# Altium schematic symbol library Inductor.SchLib: 326 symbols (part 6 of 7)
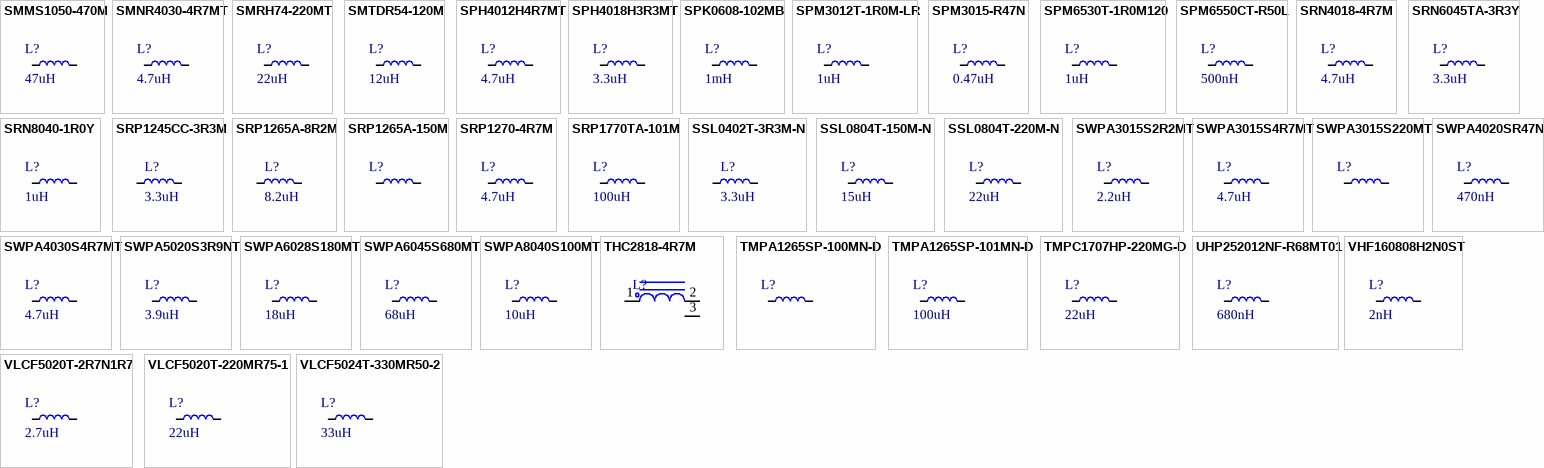
[diagram p13: symbols SMMS1050-470M to VLCF5024T-330MR50-2]

## SPH4012H4R7MT
designator L?, comment 4.7uH
1.2A 4.7uH ±20% 108mΩ SMD Power Inductors ROHS; Manufacturer: Sunlord; Manufacturer Part Number: SPH4012H4R7MT; Supplier 1: Digi-Key; RoHS: No; Pricing 1: 4500=0.21008 (USD); Supplier Part Number 1: 3442-SPH4012H4R7MTTR-ND; LCSC Part Number: C98396; Item Type: Inductor; ComponentLink1Description: LCSC; ComponentLink1URL: https://www.lcsc.com/product-detail/Power-Inductors_Sunlord-SPH4012H4R7MT_C98396.html
footprint SPH4012H4R7MT
pins: 1, 2

## SPH4018H3R3MT
designator L?, comment 3.3uH
Fixed Ind 3.3UH 2A 66 Mohm SMD; Manufacturer: Sunlord; Manufacturer Part Number: SPH4018H3R3MT; Supplier 1: Digi-Key; RoHS: No; Supplier Part Number 1: 3442-SPH4018H3R3MTTR-ND; LCSC Part Number: C98399
footprint SPH4018H3R3MT_
pins: 1, 2

## SPK0608-102MB
designator L?, comment 1mH
200mA 1mH ±20% Plugin,D7xL11mm Color Ring Inductors/Through Hole Inductors ROHS; Manufacturer: LanTu Micro; Manufacturer Part Number: SPK0608-102MB; ComponentLink1Description: LCSC; ComponentLink1URL: https://www.lcsc.com/product-detail/Color-Ring-Inductors-Through-Hole-Inductors_LanTu-Micro-SPK0608-102MB_C5127530.html; Package: Plugin,D7xL11mm; LCSC Part Number: C5127530; Item Type: Through Hole Inductor
footprint SPK0608-102MB
pins: 1, 2

## SPM3012T-1R0M-LR
designator L?, comment 1uH
FIXED IND 1UH 3.4A 59.4 MOHM SMD; Manufacturer: TDK; Manufacturer Part Number: SPM3012T-1R0M-LR; Item Type: Inductors; Supplier: Avnet; LCSC Part Number: C501975; RoHS: Yes; Stock: 20000; Pricing: 2000=0.4697, 4000=0.45815, 8000=0.4466 (USD); ComponentLink1URL: https://product.tdk.com/info/en/catalog/datasheets/inductor_commercial_power_spm3012-lr_en.pdf?ref_disty=digikey&src-supplier=Digikey; ComponentLink1Description: https://product.tdk.com/info/en/catalog/datasheets/inductor_commercial_power_spm3012-lr_en.pdf?ref_disty=digikey&src-supplier=Digikey; ComponentLink2URL: https://product.tdk.com/info/en/catalog/datasheets/inductor_commercial_power_spm3012-lr_en.pdf?src-supplier=Digikey; ComponentLink2Description: https://product.tdk.com/info/en/catalog/datasheets/inductor_commercial_power_spm3012-lr_en.pdf?src-supplier=Digikey; ComponentLink3URL: http://www.farnell.com/datasheets/2053093.pdf?src-supplier=Element14; ComponentLink3Description: http://www.farnell.com/datasheets/2053093.pdf?src-supplier=Element14; ComponentLink4URL: https://datasheet.octopart.com/SPM3012T-1R0M-LR-TDK-datasheet-62334280.pdf?src-supplier=Newark; ComponentLink4Description: https://datasheet.octopart.com/SPM3012T-1R0M-LR-TDK-datasheet-62334280.pdf?src-supplier=Newark
footprint SPM3012T-1R0M-LR
pins: 1, 2

## SPM3015-R47N
designator L?, comment 0.47uH
3.7A 0.47uH ±30% 6A 1212 Power Inductors ROHS; Manufacturer: KOHERelec; Manufacturer Part Number: SPM3015-R47N; Package: 1212; LCSC Part Number: C2761886; Item Type: Inductor; ComponentLink1Description: LCSC; ComponentLink1URL: https://www.lcsc.com/product-detail/Power-Inductors_KOHERelec-SPM3015-R47N_C2761886.html?s_z=n_744383350047
footprint SPM3015-R47N
pins: 1, 2

## SPM6530T-1R0M120
designator L?, comment 1uH
FIXED IND 1UH 13A 7.81 MOHM SMD; Manufacturer: TDK; Manufacturer Part Number: SPM6530T-1R0M120; Item Type: Inductors; Supplier: Arrow Electronics; LCSC Part Number: C87572; RoHS: Yes; Stock: 12000; Pricing: 1000=0.5301, 2000=0.4841, 3000=0.4837, 5000=0.4592, 7000=0.433, 10000=0.416 (USD); Lead Free: 5697LeadFree; ComponentLink1URL: https://datasheet.ciiva.com/22729/e531-spm-22729324.pdf?src-supplier=Element14; ComponentLink1Description: https://datasheet.ciiva.com/22729/e531-spm-22729324.pdf?src-supplier=Element14; ComponentLink2URL: https://datasheet.ciiva.com/8045/1649093-8045737.pdf?src-supplier=Element14; ComponentLink2Description: https://datasheet.ciiva.com/8045/1649093-8045737.pdf?src-supplier=Element14; ComponentLink3URL: https://datasheet.ciiva.com/15992/e531-spm6530-15992135.pdf?src-supplier=Onlinecomponents.com; ComponentLink3Description: https://datasheet.ciiva.com/15992/e531-spm6530-15992135.pdf?src-supplier=Onlinecomponents.com; ComponentLink4URL: https://datasheet.ciiva.com/1047/e531-spm-1047419.pdf?src-supplier=Digikey; ComponentLink4Description: https://datasheet.ciiva.com/1047/e531-spm-1047419.pdf?src-supplier=Digikey; ComponentLink5URL: https://datasheet.ciiva.com/1047/e531-spm-1047420.pdf?src-supplier=Digikey; ComponentLink5Description: https://datasheet.ciiva.com/1047/e531-spm-1047420.pdf?src-supplier=Digikey; ComponentLink6URL: https://datasheet.ciiva.com/1047/e531-spm-1047421.pdf?src-supplier=Digikey; ComponentLink6Description: https://datasheet.ciiva.com/1047/e531-spm-1047421.pdf?src-supplier=Digikey; ComponentLink7URL: https://datasheet.ciiva.com/16488/inductor-commercial-power-spm-en-16488758.pdf?src-supplier=Future+Electronics; ComponentLink7Description: https://datasheet.ciiva.com/16488/inductor-commercial-power-spm-en-16488758.pdf?src-supplier=Future+Electronics
footprint SPM6530T-1R0M120
pins: 1, 2

## SPM6550CT-R50L
designator L?, comment 500nH
13.2A 500nH ±15% 3.9mΩ 20.4A - Power Inductors ROHS; Manufacturer: TDK; Manufacturer Part Number: SPM6550CT-R50L; Supplier 1: Arrow Electronics; RoHS: No; Category: Fixed Inductors; Stock 1: 629; Pricing 1: 1=0.46220, 10=0.45510, 25=0.44790, 50=0.44080, 100=0.43370, 250=0.42650, 500=0.41940 (USD); LCSC Part Number: C2045557; Item Type: Inductor; Supplier Part Number 1: SPM6550CT-R50L; ComponentLink1Description: LCSC; ComponentLink1URL: https://www.lcsc.com/product-detail/Power-Inductors_TDK-SPM6550CT-R50L_C2045557.html
footprint SPM6550CT-R50L
pins: 1, 2

## SRN4018-4R7M
designator L?, comment 4.7uH
FIXED IND 4.7UH 1.9A 84 MOHM SMD; Manufacturer: Bourns; Manufacturer Part Number: SRN4018-4R7M; Core Material: Ferrite; Material: Steel; Saturation Current: 2A; Tolerance: 20%; Shielding: Shielded; DC Resistance (DCR): 84mR; Self Resonant Frequency: 35MHz; Test Frequency: 100kHz; Q Factor: 9NUMBER; Supplier: Rs; LCSC Part Number: C780206; RoHS: Yes; Category: Fixed Inductors; Stock: 13110; Mounting Technology: Surface Mount; Case/Package: Nonstandard; Pins: 2; Min Operating Temperature: -25°C; Max Operating Temperature: 120°C; Packaging: Cut Tape; Package Quantity: 3000; Current Rating: 1.9A; Value: 4.7uH; Inductance Tolerance: 20%; Max DC Current: 1.9A; Termination: SMD/SMT; RMS Current (Irms): 1.9A; Series: SRN4018; Sample Rate (Hz): 100kHz; ESR: 84mR; Length: 4mm; Width: 4mm; Height: 1.8mm; Height - Seated (Max): 0.071inch; Depth: 4.2mm; Radiation Hardening: No; Reach SVHC Compliant: No; RoHS Compliant: Yes; ComponentLink1URL: https://datasheet.ciiva.com/6700/srn4018-6700960.pdf?src-supplier=Digikey; ComponentLink1Description: https://datasheet.ciiva.com/6700/srn4018-6700960.pdf?src-supplier=Digikey; Supplier Part Number: C135270; Pricing: 10=0.0497, 100=0.0399, 300=0.035, 2000=0.0313, 4000=0.0283, 10000=0.0269 (USD)
footprint SRN4018-4R7M
pins: 1, 2

## SRN6045TA-3R3Y
designator L?, comment 3.3uH
FIXED IND 3.3UH 5A 21 MOHM SMD; Manufacturer: Bourns; Manufacturer Part Number: SRN6045TA-3R3Y; Saturation Current: 7.8A; DC Resistance (DCR): 21mR; Inductance Tolerance: 30%; Supplier 1: Digi-Key; Stock 1: 12225; Pricing 1: 1=0.59, 10=0.514, 25=0.4776, 50=0.4042, 100=0.3675, 250=0.34544, 500=0.3087 (USD); Mount: Surface Mount; Inductance: 3.3uH; RMS Current (Irms): 5A; Packaging: Cut Tape; REACH SVHC: No SVHC; RoHS Compliant: Yes; ComponentLink1URL: http://www.farnell.com/datasheets/2647414.pdf?src-supplier=Farnell; ComponentLink1Description: http://www.farnell.com/datasheets/2647414.pdf?src-supplier=Farnell; ComponentLink2URL: http://www.farnell.com/datasheets/2113223.pdf?src-supplier=Element14; ComponentLink2Description: http://www.farnell.com/datasheets/2113223.pdf?src-supplier=Element14; ComponentLink3URL: http://www.farnell.com/datasheets/2647414.pdf?src-supplier=Newark; ComponentLink3Description: http://www.farnell.com/datasheets/2647414.pdf?src-supplier=Newark; ComponentLink4URL: https://www.bourns.com/docs/Product-Datasheets/SRN6045TA.pdf?src-supplier=Digi-Key; ComponentLink4Description: https://www.bourns.com/docs/Product-Datasheets/SRN6045TA.pdf?src-supplier=Digi-Key; Supplier Part Number 1: SRN6045TA-3R3YCT-ND; LCSC Part Number: C3221229
footprint SRN6045TA-3R3Y_
pins: 1, 2

## SRN8040-1R0Y
designator L?, comment 1uH
7.8A 1uH ±30% 11A SMD,7.9x8.2mm Power Inductors ROHS; Manufacturer: BOURNS; Manufacturer Part Number: SRN8040-1R0Y; Footprint: Custom; ComponentLink1Description: LCSC; ComponentLink1URL: https://www.lcsc.com/product-detail/Power-Inductors_BOURNS-SRN8040-1R0Y_C2041438.html; LCSC Part Number: C2041438
footprint SRN8040-1R0Y
pins: 1, 2

## SRP1245CC-3R3M
designator L?, comment 3.3uH
IND SMD 3.3UH 20A; Manufacturer: Bourns; Manufacturer Part Number: SRP1245CC-3R3M; Item Type: Inductor; Supplier: Digikey; Supplier Part Number: 118-SRP1245CC-3R3MCT-ND; Stock: 494; Pricing: 1=1.67, 10=1.417, 25=1.3056, 50=1.1666, 100=0.9721, 250=0.94436 (USD)
footprint SRP1245CC-3R3M
pins: 1, 2

## SRP1265A-8R2M
designator L?, comment 8.2uH
FIXED IND 8.2UH 10.5A 15.5 MOHM; Manufacturer: Bourns; Manufacturer Part Number: SRP1265A-8R2M; Core Material: Carbonyl Powder; Inductance Tolerance: 20%; Saturation Current: 16A; Shielding: Shielded; DC Resistance (DCR): 15.5mR; Self Resonant Frequency: 11MHz; Test Frequency: 100kHz; Item Type: Inductor; Supplier: Avnet; Supplier Part Number: 64X8728; RoHS: Yes; Category: Fixed Inductors; Stock: 27; Pricing: 1=0.97 (USD); Mounting Technology: Surface Mount; Case/Package: Nonstandard; Min Operating Temperature: -40°C; Max Operating Temperature: 150°C; Packaging: Cut Tape; Tolerance: 20%; Value: 8.2uH; Current Rating: 10.5A; Max DC Current: 10.5A; Termination: SMD/SMT; RMS Current (Irms): 10.5A; Series: SRP1265A; Length: 0.531inch; Width: 0.492inch; Height: 6.2mm; Height - Seated (Max): 0.252inch; Depth: 12.5mm; Ratings: AEC-Q200; Radiation Hardening: No; Reach SVHC Compliant: No; RoHS Compliant: Yes; ComponentLink1URL: https://datasheet.ciiva.com/48685/srp1265a-48685302.pdf?src-supplier=Avnet; ComponentLink1Description: https://datasheet.ciiva.com/48685/srp1265a-48685302.pdf?src-supplier=Avnet; LCSC Part Number: C2042528
footprint SRP1265A-8R2M
pins: 1, 2

## SRP1265A-150M
designator L?
FIXED IND 15UH 9A 28 MOHM SMD; Manufacturer: Bourns; Manufacturer Part Number: SRP1265A-150M; Item Type: Inductors; Supplier: Digikey; LCSC Part Number: C189912; RoHS: Yes; Stock: 3333; Pricing: 1=1.86, 10=1.446, 25=1.3076, 50=1.2114, 100=1.1221, 250=1.0136 (USD); ComponentLink1URL: http://www.mouser.com/ds/2/54/SRP1265A-558458.pdf?src-supplier=Mouser; ComponentLink1Description: http://www.mouser.com/ds/2/54/SRP1265A-558458.pdf?src-supplier=Mouser; ComponentLink2URL: https://media.digikey.com/pdf/Data%20Sheets/Bourns%20PDFs/SRP_Series_Bltn.pdf?src-supplier=Digikey; ComponentLink2Description: https://media.digikey.com/pdf/Data%20Sheets/Bourns%20PDFs/SRP_Series_Bltn.pdf?src-supplier=Digikey; ComponentLink3URL: http://components.arrow.com/part/dataview/66888460S852199N9116?src-supplier=Arrow+Electronics; ComponentLink3Description: http://components.arrow.com/part/dataview/66888460S852199N9116?src-supplier=Arrow+Electronics; ComponentLink4URL: http://www.farnell.com/datasheets/2059704.pdf?src-supplier=Farnell; ComponentLink4Description: http://www.farnell.com/datasheets/2059704.pdf?src-supplier=Farnell; ComponentLink5URL: http://uk.rs-online.com/webdocs/133a/0900766b8133ab5d.pdf?src-supplier=Rs; ComponentLink5Description: http://uk.rs-online.com/webdocs/133a/0900766b8133ab5d.pdf?src-supplier=Rs; ComponentLink6URL: http://www.alliedelec.com/images/products/datasheets/bm/BOURNS/70377570.pdf?src-supplier=Allied+Electronics; ComponentLink6Description: http://www.alliedelec.com/images/products/datasheets/bm/BOURNS/70377570.pdf?src-supplier=Allied+Electronics; ComponentLink7URL: https://datasheet.octopart.com/SRP1265A-150M-Bourns-datasheet-57227458.pdf?src-supplier=Newark; ComponentLink7Description: https://datasheet.octopart.com/SRP1265A-150M-Bourns-datasheet-57227458.pdf?src-supplier=Newark; ComponentLink8URL: http://www.bourns.com/data/global/pdfs/SRP1265A.pdf?src-supplier=Avnet; ComponentLink8Description: http://www.bourns.com/data/global/pdfs/SRP1265A.pdf?src-supplier=Avnet; ComponentLink9URL: http://www.farnell.com/datasheets/2059704.pdf?src-supplier=Newark; ComponentLink9Description: http://www.farnell.com/datasheets/2059704.pdf?src-supplier=Newark; ComponentLink10URL: http://www.farnell.com/datasheets/2059704.pdf?src-supplier=Element14; ComponentLink10Description: http://www.farnell.com/datasheets/2059704.pdf?src-supplier=Element14
footprint SRP1265A-150M
pins: 1, 2

## SRP1270-4R7M
designator L?, comment 4.7uH
FIXED IND 4.7UH 15A 11.2MOHM SMD; Manufacturer: Bourns; Manufacturer Part Number: SRP1270-4R7M; Item Type: Inductor; Supplier: Digikey; Supplier Part Number: SRP1270-4R7MCT-ND; RoHS: Yes; Stock: 18208; Pricing: 1=1.55, 10=1.319, 25=1.216, 50=1.0866, 100=0.9055 (USD); ComponentLink1URL: https://datasheet.ciiva.com/11803/0900766b80f2b679-11803001.pdf?src-supplier=Rs; ComponentLink1Description: https://datasheet.ciiva.com/11803/0900766b80f2b679-11803001.pdf?src-supplier=Rs; ComponentLink2URL: https://datasheet.ciiva.com/17045/70277161-17045933.pdf?src-supplier=Allied+Electronics; ComponentLink2Description: https://datasheet.ciiva.com/17045/70277161-17045933.pdf?src-supplier=Allied+Electronics; ComponentLink3URL: https://datasheet.ciiva.com/7849/1834359-7849561.pdf?src-supplier=Element14; ComponentLink3Description: https://datasheet.ciiva.com/7849/1834359-7849561.pdf?src-supplier=Element14; ComponentLink4URL: https://datasheet.ciiva.com/8515/srp1270-8515814.pdf?src-supplier=Avnet; ComponentLink4Description: https://datasheet.ciiva.com/8515/srp1270-8515814.pdf?src-supplier=Avnet; ComponentLink5URL: https://datasheet.ciiva.com/8517/srp1270-8517062.pdf?src-supplier=Avnet; ComponentLink5Description: https://datasheet.ciiva.com/8517/srp1270-8517062.pdf?src-supplier=Avnet
footprint SRP1270-4R7M
pins: 1, 2

## SRP1770TA-101M
designator L?, comment 100uH
FIXED IND 100UH 5.3A 118MOHM SMD; Manufacturer: Bourns Inc.; Manufacturer Part Number: SRP1770TA-101M; Item Type: Inductor; Package: Custom; LCSC Part Number: -; ComponentLink1Description: LCSC; ComponentLink1URL: *
footprint SRP1770TA-101M
pins: 1, 2

## SSL0402T-3R3M-N
designator L?, comment 3.3uH
2A 3.3uH ±20% 2A SMD Power Inductors ROHS; Manufacturer: Chilisin Elec; Manufacturer Part Number: SSL0402T-3R3M-N; Package: SMD; LCSC Part Number: C329862; Item Type: Inductor; ComponentLink1Description: LCSC; ComponentLink1URL: https://www.lcsc.com/product-detail/Power-Inductors_Chilisin-Elec-SSL0402T-3R3M-N_C329862.html
footprint SSL0402T-3R3M-N
pins: 1, 2

## SSL0804T-150M-N
designator L?, comment 15uH
3A 15uH ±20% 0.046Ω 3A SMD Power Inductors ROHS; Manufacturer: Chilisin Elec; Manufacturer Part Number: SSL0804T-150M-N; Package: SMD; LCSC Part Number: C329870; Item Type: Inductor; ComponentLink1Description: LCSC; ComponentLink1URL: https://www.lcsc.com/product-detail/Power-Inductors_Chilisin-Elec-SSL0804T-150M-N_C329870.html
footprint SSL0804T-150M-N.
pins: 1, 2

## SSL0804T-220M-N
designator L?, comment 22uH
2.6A 22uH ±20% 0.085Ω 2.6A SMD,12.95x9.4x5.21mm Power Inductors ROHS; Manufacturer: Chilisin Elec; Manufacturer Part Number: SSL0804T-220M-N; Package: SMD,12.95x9.4x5.21mm; LCSC Part Number: C108312; Item Type: Inductor; ComponentLink1Description: LCSC; ComponentLink1URL: https://www.lcsc.com/product-detail/Power-Inductors_Chilisin-Elec-SSL0804T-220M-N_C108312.html
footprint SSL0804T-220M-N
pins: 1, 2

## SWPA3015S2R2MT
designator L?, comment 2.2uH
2A 2.2uH ±20% SMD,3x3mm Power Inductors ROHS; Manufacturer: Sunlord; Manufacturer Part Number: SWPA3015S2R2MT; Package: SMD,3x3mm; LCSC Part Number: C43389; Item Type: Inductor; ComponentLink1Description: LCSC; ComponentLink1URL: https://www.lcsc.com/product-detail/Power-Inductors_Sunlord-SWPA3015S2R2MT_C43389.html
footprint SWPA3015S2R2MT
pins: 1, 2

## SWPA3015S4R7MT
designator L?, comment 4.7uH
Fixed Ind 4.720%UH 0.125 Ohm 1400; Manufacturer: Sunlord; Manufacturer Part Number: SWPA3015S4R7MT; Supplier 1: Digi-Key; RoHS: Yes; Category: Fixed Inductors; Stock 1: 2802; Pricing 1: 1=0.41000, 10=0.36400, 25=0.31800, 50=0.27280, 100=0.25000, 250=0.22724, 500=0.21362, 1000=0.16362 (USD); RoHS Compliant: Yes; Supplier Part Number 1: 3442-SWPA3015S4R7MTCT-ND; LCSC Part Number: C19398
footprint SWPA3015S4R7MT_
pins: 1, 2

## SWPA3015S220MT
designator L?
FIXED IND 22UH 570MA 598MOHM SMD; Manufacturer: Sunlord; Manufacturer Part Number: SWPA3015S220MT; Item Type: Inductor; Supplier: Digikey; Supplier Part Number: 3442-SWPA3015S220MTTR-ND; RoHS: No; Category: Fixed Inductors; Pricing: 2000=0.15453 (USD); LCSC Part Number: C83438
footprint SWPA3015S220MT
pins: 1, 2

## SWPA4020SR47NT
designator L?, comment 470nH
FIXED IND 470NH 3.3A 29MOHM SMD; Manufacturer: Sunlord; Manufacturer Part Number: SWPA4020SR47NT; Item Type: Inductor; Package: SMD; LCSC Part Number: C98415; ComponentLink1Description: LCSC; ComponentLink1URL: https://www.lcsc.com/product-detail/span-style-background-color-ff0-Power-span-Inductors_Sunlord-SWPA4020SR47NT_C98415.html
footprint SWPA4020SR47NT
pins: 1, 2

## SWPA4030S4R7MT
designator L?, comment 4.7uH
Fixed Ind 4.720%UH 0.06 Ohm 3200M; Manufacturer: Sunlord; Manufacturer Part Number: SWPA4030S4R7MT; Supplier 1: Digi-Key; RoHS: Yes; Category: Fixed Inductors; Stock 1: 3730; Pricing 1: 1=0.44000, 10=0.38900, 25=0.36120, 50=0.30560, 100=0.27780, 250=0.26108, 500=0.23332, 1000=0.18887 (USD); RoHS Compliant: Yes; Supplier Part Number 1: 3442-SWPA4030S4R7MTCT-ND; LCSC Part Number: C57269
footprint SWPA4030S4R7MT_
pins: 1, 2

## SWPA5020S3R9NT
designator L?, comment 3.9uH
FIXED IND 3.9UH 2.5A 56MOHM SMD; Manufacturer: Sunlord; Manufacturer Part Number: SWPA5020S3R9NT; Item Type: Inductor; Supplier: Digi-Key; Supplier Part Number: 3442-SWPA5020S3R9NTTR-ND; RoHS: No; Category: Fixed Inductors; Pricing: 2500=0.21917 (USD); LCSC Part Number: C115009
footprint SWPA5020S3R9NT
pins: 1, 2

## SWPA6028S180MT
designator L?, comment 18uH
FIXED IND 18UH 1.45A 156MOHM SMD; Manufacturer: Sunlord; Manufacturer Part Number: SWPA6028S180MT; Item Type: Inductor; Supplier: Digikey; LCSC Part Number: C96939; RoHS: No
footprint SWPA6028S180MT
pins: 1, 2

## SWPA6045S680MT
designator L?, comment 68uH
1A 68uH ±20% 1.2A SMD,6x6mm Power Inductors ROHS; Manufacturer: Sunlord; Manufacturer Part Number: SWPA6045S680MT; Supplier: Digikey; LCSC Part Number: C53663; RoHS: Yes; Item Type: Inductors; Pricing: 1500=0.39137 (USD); RoHS Compliant: Yes
footprint SWPA6045S680MT
pins: 1, 2

## SWPA8040S100MT
designator L?, comment 10uH
Fixed Ind 1020%UH 0.029 Ohm 4100M; Manufacturer: Sunlord; Manufacturer Part Number: SWPA8040S100MT; Item Type: Inductor; Supplier 1: Digi-Key; RoHS: Yes; Category: Fixed Inductors; Stock 1: 2032; Pricing 1: 1=1.24, 10=1.149, 25=1.0604, 50=0.8838, 100=0.8307, 250=0.74236, 500=0.6363 (USD); RoHS Compliant: Yes; Supplier Part Number 1: 3442-SWPA8040S100MTCT-ND; LCSC Part Number: C37429; ComponentLink1Description: LCSC; ComponentLink1URL: https://www.lcsc.com/product-detail/Power-Inductors_Sunlord-SWPA8040S100MT_C37429.html
footprint SWPA8040S100MT
pins: 1, 2

## THC2818-4R7M
designator L?
28A 4.7uH ±20% 61.2A 2.6mΩ SMD-3P,19.7x27.9mm Inductors (SMD) ROHS; Manufacturer: KOHERelec; Manufacturer Part Number: THC2818-4R7M; Package: SMD-3P,19.7x27.9mm; LCSC Part Number: C2761984; Item Type: Inductors; ComponentLink1Description: LCSC; ComponentLink1URL: https://www.lcsc.com/product-detail/Inductors-SMD_KOHERelec-THC2818-4R7M_C2761984.html
footprint THC2818-4R7M
pins: 1, 2, 3

## TMPA1265SP-100MN-D
designator L?
13A 10uH ±20% 17A SMD,12.6x13.5mm Power Inductors ROHS; Manufacturer: TAI-TECH; Manufacturer Part Number: TMPA1265SP-100MN-D; Package: SMD,12.6x13.5mm; LCSC Part Number: C2880060; Item Type: Inductor; ComponentLink1Description: LCSC; ComponentLink1URL: https://www.lcsc.com/product-detail/Power-Inductors_TAI-TECH-TMPA1265SP-100MN-D_C2880060.html
footprint TMPA1265SP-100MN-D
pins: 1, 2

## TMPA1265SP-101MN-D
designator L?, comment 100uH
3.8A 100uH ±20% SMD,12.6x13.5mm Power Inductors ROHS; Manufacturer: TAI-TECH; Manufacturer Part Number: TMPA1265SP-101MN-D; Package: SMD,12.6x13.5mm; LCSC Part Number: C357118; Item Type: Inductor; ComponentLink1Description: LCSC; ComponentLink1URL: https://www.lcsc.com/product-detail/Power-Inductors_TAI-TECH-TMPA1265SP-101MN-D_C357118.html
footprint TMPA1265SP-101MN-D
pins: 1, 2

## TMPC1707HP-220MG-D
designator L?, comment 22uH
12A 22uH ±20% SMD Power Inductors ROHS; Manufacturer: TAI-TECH; Manufacturer Part Number: TMPC1707HP-220MG-D; Package: SMD; LCSC Part Number: C357281; Item Type: INDUCTOR; ComponentLink1Description: LCSC; ComponentLink1URL: https://www.lcsc.com/product-detail/C357281.html
footprint TMPC1707HP-220MG-D
pins: 1, 2

## UHP252012NF-R68MT01
designator L?, comment 680nH
3A 680nH ±20% 1008 Power Inductors ROHS; Manufacturer: TAI-TECH; Manufacturer Part Number: UHP252012NF-R68MT01; Package: 1008; LCSC Part Number: C305246; Item Type: Inductor; ComponentLink1Description: LCSC; ComponentLink1URL: https://www.lcsc.com/product-detail/Power-Inductors_TAI-TECH-UHP252012NF-R68MT01_C305246.html.
footprint UHP252012NF-R68MT01
pins: 1, 2

## VHF160808H2N0ST
designator L?, comment 2nH
2nH ±0.3nH 0603 Inductors (SMD) ROHS; Manufacturer Part Number: VHF160808H2N0ST; Manufacturer: FH; Footprint: 0603; Value: 2nH; ComponentLink1Description: LCSC; ComponentLink1URL: https://lcsc.com/product-detail/Inductors-SMD_FH-Guangdong-Fenghua-Advanced-Tech-VHF160808H2N0ST_C395081.html; LCSC Part Number: C395081; Item Type: Inductor
footprint IND-0603 (1608 Metric) (0.063" L x 0.032" W (1.60mm x 0.80mm))
pins: 1, 2

## VLCF5020T-2R7N1R7
designator L?, comment 2.7uH
FIXED IND 2.7UH 1.76A 71 MOHM; Manufacturer: TDK; Manufacturer Part Number: VLCF5020T-2R7N1R7; Core Material: Ferrite; DC Resistance (DCR): 71mR; Tolerance: 30%; Test Frequency: 100kHz; Max DC Current: 1.7A; RMS Current (Irms): 2.51A; Shielding: Shielded; Item Type: Inductor; Supplier 1: Digi-Key; RoHS: Yes; Category: Fixed Inductors; Stock 1: 1500; Pricing 1: 1=0.79000, 10=0.69300, 25=0.64360, 50=0.54440, 100=0.49500, 250=0.46528 (USD); Mount: Surface Mount; Case/Package: Nonstandard; Number of Pins: 2; Min Operating Temperature: -40°C; Max Operating Temperature: 105°C; Inductance: 2.7uH; Packaging: Tape and Reel; Inductance Tolerance: 30%; Resistor Type: Wirewound; Termination: SMD/SMT; Package Quantity: 500; Current Rating: 1.76A; Saturation Current: 1.76A; Length: 0.197inch; Width: 0.197inch; Height: 2mm; Depth: 5.2mm; Height - Seated (Max): 0.079inch; Radiation Hardening: No; Lead Free: Lead Free; Military Standard: Not; REACH SVHC: No SVHC; ComponentLink1URL: https://datasheet.ciiva.com/11799/0900766b807a173e-11799677.pdf?src-supplier=RSComponents; ComponentLink1Description: https://datasheet.ciiva.com/11799/0900766b807a173e-11799677.pdf?src-supplier=RSComponents; ComponentLink2URL: https://datasheet.ciiva.com/15993/e531-vlcf5020-15993504.pdf?src-supplier=Onlinecomponents.com; ComponentLink2Description: https://datasheet.ciiva.com/15993/e531-vlcf5020-15993504.pdf?src-supplier=Onlinecomponents.com; ComponentLink3URL: https://datasheet.ciiva.com/8045/516785-8045805.pdf?src-supplier=Element14; ComponentLink3Description: https://datasheet.ciiva.com/8045/516785-8045805.pdf?src-supplier=Element14; Supplier Part Number 1: 445-3194-1-ND; LCSC Part Number: C307836
footprint VLCF5020T-2R7N1R7. (FIXED IND 2.7UH 1.76A 71MOHM SMD)
pins: 1, 2

## VLCF5020T-220MR75-1
designator L?, comment 22uH
FIXED IND 22UH 750MA 496MOHM SMD; Manufacturer: TDK; Manufacturer Part Number: VLCF5020T-220MR75-1; Item Type: Inductors; Supplier: Avnet; LCSC Part Number: C87576; RoHS: Yes; Stock: 1000; Pricing: 500=0.2562 (USD); ComponentLink1URL: https://datasheet.ciiva.com/11800/0900766b807a173e-11800091.pdf?src-supplier=Rs; ComponentLink1Description: https://datasheet.ciiva.com/11800/0900766b807a173e-11800091.pdf?src-supplier=Rs; ComponentLink2URL: https://datasheet.ciiva.com/4956/e531-vlcf-18500-4956649.pdf?src-supplier=Mouser; ComponentLink2Description: https://datasheet.ciiva.com/4956/e531-vlcf-18500-4956649.pdf?src-supplier=Mouser; ComponentLink3URL: https://datasheet.ciiva.com/8045/516785-8045801.pdf?src-supplier=Element14; ComponentLink3Description: https://datasheet.ciiva.com/8045/516785-8045801.pdf?src-supplier=Element14; ComponentLink4URL: https://datasheet.ciiva.com/22725/516785-22725947.pdf?src-supplier=Element14; ComponentLink4Description: https://datasheet.ciiva.com/22725/516785-22725947.pdf?src-supplier=Element14
footprint VLCF5020T-220MR75-1
pins: 1, 2

## VLCF5024T-330MR50-2
designator L?, comment 33uH
FIXED IND 33UH 500MA 275MOHM SMD; Manufacturer: TDK; Manufacturer Part Number: VLCF5024T-330MR50-2; Core Material: Ferrite; Tolerance: 20%; Shielding: Shielded; DC Resistance (DCR): 275mR; Test Frequency: 100kHz; RMS Current (Irms): 1.24A; Item Type: Inductor; Supplier 1: Mouser; RoHS: Yes; Category: Fixed Inductors; Stock 1: 559; Pricing 1: 1=1.23000, 10=0.91900, 50=0.91900, 100=0.77200, 1000=0.57700, 10000=0.53200 (USD); Mounting Technology: Surface Mount; Case/Package: Nonstandard; Min Operating Temperature: -40°C; Max Operating Temperature: 105°C; Packaging: Cut Tape; Inductance Tolerance: 20%; Package Quantity: 500; Current Rating: 500mA; Saturation Current: 500mA; Resistor Type: Wirewound; Value: 33uH; Max DC Current: 500mA; Series: VLCF; Length: 0.197inch; Width: 0.197inch; Height: 2.4mm; Height - Seated (Max): 0.094inch; Reach SVHC Compliant: Yes; RoHS Compliant: Yes; ComponentLink1URL: https://datasheet.ciiva.com/22729/1724253-22729224.pdf?src-supplier=Element14; ComponentLink1Description: https://datasheet.ciiva.com/22729/1724253-22729224.pdf?src-supplier=Element14; Supplier Part Number 1: 810-VLCF524T330MR502; LCSC Part Number: C2046704
footprint VLCF5024T-330MR50-2
pins: 1, 2

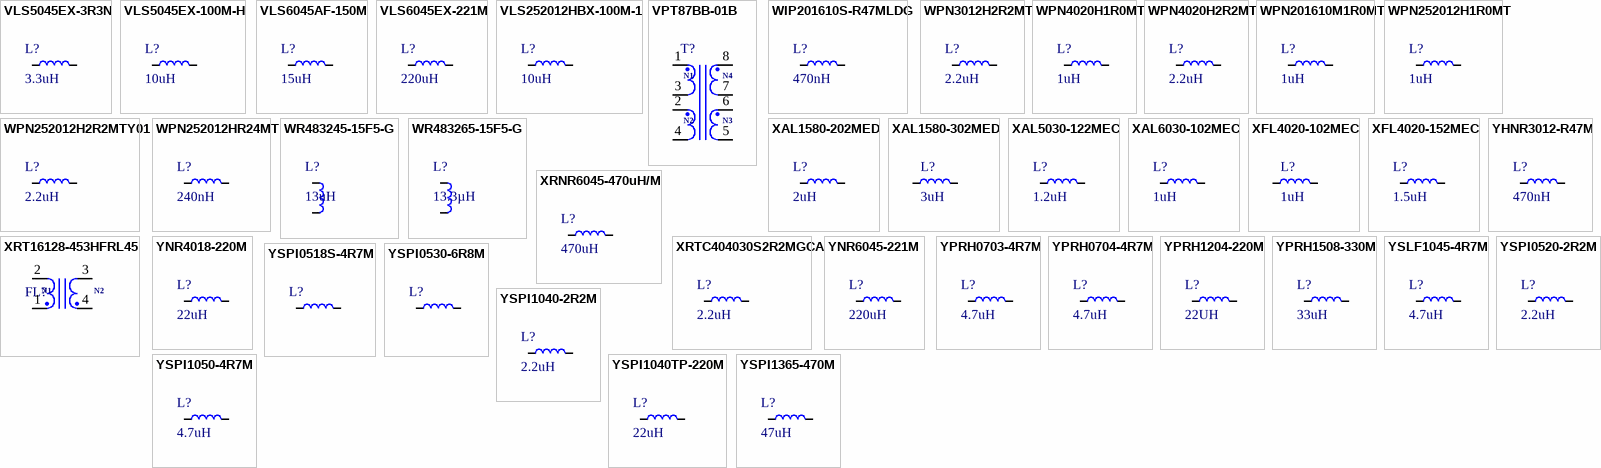
[diagram p7: symbols VLS5045EX-3R3N to YSPI1365-470M]

## VLS5045EX-3R3N
designator L?, comment 3.3uH
FIXED IND 3.3UH 4.2A 35.1MOHM SM; Manufacturer: TDK; Manufacturer Part Number: VLS5045EX-3R3N; Core Material: Ferrite; Saturation Current: 5.2A; Shielding: Shielded; DC Resistance (DCR): 35.1mR; Test Frequency: 100kHz; Tolerance: 30%; Item Type: Inductor; Supplier: Digi-Key; Supplier Part Number: 445-174398-1-ND; RoHS: Yes; Category: Fixed Inductors; Stock: 140631; Pricing: 1=0.42, 10=0.371, 25=0.3448, 50=0.2916, 100=0.2651, 250=0.2492, 500=0.2227 (USD); Mounting Technology: Surface Mount; Case/Package: Nonstandard; Min Operating Temperature: -40°C; Max Operating Temperature: 105°C; Packaging: Cut Tape; Value: 3.3uH; Series: VLS-EX; RoHS Compliant: Yes; ComponentLink1URL: http://www.farnell.com/datasheets/2339796.pdf?src-supplier=Farnell; ComponentLink1Description: http://www.farnell.com/datasheets/2339796.pdf?src-supplier=Farnell; ComponentLink2URL: https://media.digikey.com/pdf/Data%20Sheets/TDK%20PDFs/VLS-EX_Series_Br.pdf?src-supplier=Digi-Key; ComponentLink2Description: https://media.digikey.com/pdf/Data%20Sheets/TDK%20PDFs/VLS-EX_Series_Br.pdf?src-supplier=Digi-Key; ComponentLink3URL: http://www.farnell.com/datasheets/2339796.pdf?src-supplier=Element14; ComponentLink3Description: http://www.farnell.com/datasheets/2339796.pdf?src-supplier=Element14; ComponentLink4URL: http://www.farnell.com/datasheets/2339796.pdf?src-supplier=Newark; ComponentLink4Description: http://www.farnell.com/datasheets/2339796.pdf?src-supplier=Newark; LCSC Part Number: C307875
footprint VLS5045EX-3R3N
pins: 1, 2

## VLS5045EX-100M-H
designator L?, comment 10uH
FIXED IND 10UH 2.5A 79.3MOHM SMD; Manufacturer: TDK; Manufacturer Part Number: VLS5045EX-100M-H; Item Type: Inductor; Supplier: Rs; Supplier Part Number: 2119532P; RoHS: Yes; Category: Fixed Inductors; Stock: 650; Pricing: 100=0.239, 250=0.211, 500=0.197, 1000=0.183 (GBP); LCSC Part Number: C1845361; ComponentLink1Description: LCSC; ComponentLink1URL: https://www.lcsc.com/product-detail/Power-Inductors_TDK-VLS5045EX-100M-H_C1845361.html
footprint VLS5045EX-100M-H
pins: 1, 2

## VLS6045AF-150M
designator L?, comment 15uH
FIXED IND 15UH 2.8A 77 MOHM SMD; Manufacturer: TDK; Manufacturer Part Number: VLS6045AF-150M; Core Material: Ferrite; Tolerance: 20%; Saturation Current: 2.5A; Shielding: Shielded; DC Resistance (DCR): 77mR; Test Frequency: 100kHz; Item Type: Inductor; Supplier: Mouser; Supplier Part Number: 810-VLS6045AF-150M; RoHS: Yes; Category: Fixed Inductors; Stock: 1988; Pricing: 1=0.44, 10=0.415, 50=0.415, 100=0.3, 1000=0.204, 10000=0.185 (USD); Mounting Technology: Surface Mount; Case/Package: Nonstandard; Min Operating Temperature: -40°C; Max Operating Temperature: 105°C; Series: VLS; Packaging: Cut Tape; Value: 15uH; RoHS Compliant: Yes; ComponentLink1URL: https://product.tdk.com/info/en/catalog/datasheets/inductor_commercial_power_vls6045af_en.pdf?src-supplier=Digi-Key; ComponentLink1Description: https://product.tdk.com/info/en/catalog/datasheets/inductor_commercial_power_vls6045af_en.pdf?src-supplier=Digi-Key; LCSC Part Number: C2043078
footprint VLS6045AF-150M
pins: 1, 2

## VLS6045EX-221M
designator L?, comment 220uH
FIXED IND 220UH 500MA 1.495 OHM; Manufacturer: TDK; Manufacturer Part Number: VLS6045EX-221M; Core Material: Ferrite; Shielding: Shielded; DC Resistance (DCR): 1.15R; Test Frequency: 100kHz; Tolerance: 20%; Item Type: Inductor; Supplier 1: Digi-Key; RoHS: Yes; Category: Fixed Inductors; Stock 1: 4102; Pricing 1: 1=0.51000, 10=0.44300, 25=0.41120, 50=0.34780, 100=0.31620, 250=0.29728, 500=0.26564 (USD); Mount: Surface Mount; Case/Package: Nonstandard; Min Operating Temperature: -40°C; Max Operating Temperature: 105°C; Packaging: Tape and Reel; Resistor Type: Wirewound; Inductance: 220uH; Current Rating: 500mA; Length: 0.236inch; Width: 0.236inch; Height - Seated (Max): 0.177inch; RoHS Compliant: Yes; ComponentLink1URL: https://media.digikey.com/pdf/Data%20Sheets/TDK%20PDFs/VLS-EX_Series_Br.pdf?src-supplier=Digi-Key; ComponentLink1Description: https://media.digikey.com/pdf/Data%20Sheets/TDK%20PDFs/VLS-EX_Series_Br.pdf?src-supplier=Digi-Key; Supplier Part Number 1: 445-173047-1-ND; LCSC Part Number: C404509
footprint VLS6045EX-221M.
pins: 1, 2

## VLS252012HBX-100M-1
designator L?, comment 10uH
FIXED IND 10UH 1A 540 MOHM SMD; Manufacturer: TDK; Manufacturer Part Number: VLS252012HBX-100M-1; Core Material: Metal; Saturation Current: 850mA; Shielding: Shielded; DC Resistance (DCR): 540mR; Test Frequency: 1MHz; Tolerance: 20%; Item Type: Inductor; Supplier 1: Arrow Electronics; RoHS: Yes; Category: Fixed Inductors; Stock 1: 10000; Pricing 1: 2000=0.12770, 24000=0.12640 (USD); Mount: Surface Mount; Case/Package: 1008; Case Code (Metric): 2520; Case Code (Imperial): 1008; Min Operating Temperature: -40°C; Max Operating Temperature: 105°C; Packaging: Cut Tape; Resistor Type: Wirewound; Inductance: 10uH; Current Rating: 1A; RMS Current (Irms): 1A; Inductance Tolerance: 20%; Series: VLS-HBX-1; Length: 0.098inch; Width: 0.079inch; Height - Seated (Max): 0.047inch; Reach SVHC Compliant: Yes; RoHS Compliant: Yes; ComponentLink1URL: http://www.farnell.com/datasheets/1866267.pdf?src-supplier=Farnell; ComponentLink1Description: http://www.farnell.com/datasheets/1866267.pdf?src-supplier=Farnell; ComponentLink2URL: http://www.farnell.com/datasheets/2608160.pdf?src-supplier=Farnell; ComponentLink2Description: http://www.farnell.com/datasheets/2608160.pdf?src-supplier=Farnell; ComponentLink3URL: http://www.farnell.com/datasheets/2130011.pdf?src-supplier=Element14; ComponentLink3Description: http://www.farnell.com/datasheets/2130011.pdf?src-supplier=Element14; ComponentLink4URL: http://www.farnell.com/datasheets/1866267.pdf?src-supplier=Newark; ComponentLink4Description: http://www.farnell.com/datasheets/1866267.pdf?src-supplier=Newark; ComponentLink5URL: https://product.tdk.com/info/en/catalog/datasheets/inductor_commercial_power_vls252012hbx-1_en.pdf?src-supplier=Digi-Key; ComponentLink5Description: https://product.tdk.com/info/en/catalog/datasheets/inductor_commercial_power_vls252012hbx-1_en.pdf?src-supplier=Digi-Key; ComponentLink6URL: https://product.tdk.com/info/en/catalog/datasheets/inductor_commercial_power_vls252012hbx-1_en.pdf?ref_disty=digikey&src-supplier=Digi-Key; ComponentLink6Description: https://product.tdk.com/info/en/catalog/datasheets/inductor_commercial_power_vls252012hbx-1_en.pdf?ref_disty=digikey&src-supplier=Digi-Key; Supplier Part Number 1: VLS252012HBX-100M-1; LCSC Part Number: C88532
footprint IND-1008 (2520 Metric)
pins: 1, 2

## VPT87BB-01B
designator T?
2W SMD Power Transformer ROHS; Manufacturer: VPSC; Manufacturer Part Number: VPT87BB-01B; Package: SMD; LCSC Part Number: C2846914; Item Type: Transformer; ComponentLink1Description: LCSC; ComponentLink1URL: https://www.lcsc.com/product-detail/Power-span-style-background-color-ff0-Transformer-span_VPSC-VPT87BB-01B_C2846914.html
footprint VPT87BB-01B
pins: 1, 2, 3, 4, 5, 6, 7, 8
text: N1; N4; N2; N3

## WIP201610S-R47MLDG
designator L?, comment 470nH
POWER INDUCTOR 2016 0.47UH 20% D; Manufacturer: INPAQ TECHNOLOGY; Manufacturer Part Number: WIP201610S-R47MLDG; Supplier: Digikey; LCSC Part Number: C964108; RoHS: No; Item Type: Inductor; Pricing: 1=0.1, 10=0.064, 25=0.0576, 50=0.0536, 100=0.0496, 250=0.04488, 500=0.0416, 1000=0.03854 (USD)
footprint IND-0806
pins: 1, 2

## WPN3012H2R2MT
designator L?, comment 2.2uH
2.05A 2.2uH ±20% 2.8A SMD,3x3mm Power Inductors ROHS; Manufacturer: Sunlord; Manufacturer Part Number: WPN3012H2R2MT; Supplier: Digikey; LCSC Part Number: C98355; RoHS: No; Item Type: Inductors
footprint WPN3012H2R2MT
pins: 1, 2

## WPN4020H1R0MT
designator L?, comment 1uH
FIXED IND 1UH 5.8A 26 MOHM SMD; Manufacturer: Sunlord; Manufacturer Part Number: WPN4020H1R0MT; Item Type: Inductor; Supplier 1: Digi-Key; RoHS: Yes; Category: Fixed Inductors; Supplier Part Number 1: 3442-WPN4020H1R0MTTR-ND; LCSC Part Number: C98359; ComponentLink1Description: LCSC; ComponentLink1URL: https://www.lcsc.com/product-detail/Power-Inductors_Sunlord-WPN4020H1R0MT_C98359.html
footprint WPN4020H1R0MT_
pins: 1, 2

## WPN4020H2R2MT
designator L?, comment 2.2uH
Fixed Ind 2.2UH 4.3A 48MOHM SMD; Manufacturer: Sunlord; Manufacturer Part Number: WPN4020H2R2MT; Item Type: Inductor; Supplier 1: Digi-Key; RoHS: No; Stock 1: 1762; Pricing 1: 1=0.84000, 10=0.73500, 25=0.68240, 50=0.57760, 100=0.52500, 250=0.49352, 500=0.44100, 1000=0.35700 (USD); Supplier Part Number 1: 3442-WPN4020H2R2MTCT-ND; LCSC Part Number: C98361; ComponentLink1Description: LCSC; ComponentLink1URL: https://www.lcsc.com/product-detail/Power-Inductors_Sunlord-WPN4020H2R2MT_C98361.html
footprint WPN4020H2R2MT_ ((4.00mm x 4.00mm))
pins: 1, 2

## WPN201610M1R0MT
designator L?, comment 1uH
2.05A 1uH ±20% 3.35A 0806 Power Inductors ROHS; Manufacturer: Sunlord; Manufacturer Part Number: WPN201610M1R0MT; Supplier: Digi-Key; Supplier Part Number: 3442-WPN201610M1R0MTTR-ND; RoHS: Yes; Pricing: 2000=0.17776 (USD); RoHS Compliant: Yes; LCSC Part Number: C97010; Item Type: Inductor
footprint WPN201610M1R0MT
pins: 1, 2

## WPN252012H1R0MT
designator L?, comment 1uH
FIXED IND 1UH 3A 54 MOHM SMD; Manufacturer: Sunlord; Manufacturer Part Number: WPN252012H1R0MT; Item Type: Inductor; Supplier 1: Digi-Key; RoHS: Yes; Category: Fixed Inductors; Stock 1: 4813; Pricing 1: 1=0.46000, 10=0.40400, 25=0.37520, 50=0.31760, 100=0.28880, 250=0.27144, 500=0.24256, 1000=0.19635 (USD); Supplier Part Number 1: 3442-WPN252012H1R0MTCT-ND; LCSC Part Number: C98348; ComponentLink1Description: LCSC; ComponentLink1URL: https://www.lcsc.com/product-detail/Power-Inductors_Sunlord-WPN252012H1R0MT_C98348.html
footprint WPN252012H1R0MT_
pins: 1, 2

## WPN252012H2R2MTY01
designator L?, comment 2.2uH
Fixed Ind 2.220%UH 0.085 Ohm 2700; Manufacturer: Sunlord; Manufacturer Part Number: WPN252012H2R2MTY01; Item Type: Inductor; Supplier 1: Digi-Key; RoHS: Yes; Category: Fixed Inductors; Stock 1: 1965; Pricing 1: 1=0.46000, 10=0.40400, 25=0.37520, 50=0.31760, 100=0.28880, 250=0.27144, 500=0.24256, 1000=0.19635 (USD); Supplier Part Number 1: 3442-WPN252012H2R2MTY01CT-ND; ComponentLink1Description: LCSC; ComponentLink1URL: https://www.lcsc.com/product-detail/Power-Inductors_Sunlord-WPN252012H2R2MTY01_C279858.html; LCSC Part Number: C279858
footprint Inductor 1008
pins: 1, 2

## WPN252012HR24MT
designator L?, comment 240nH
4.05A 240nH ±20% 19mΩ SMD Power Inductors ROHS; Manufacturer: Sunlord; Manufacturer Part Number: WPN252012HR24MT; Footprint: Custom; ComponentLink1Description: LCSC; ComponentLink1URL: https://www.lcsc.com/product-detail/Power-Inductors_Sunlord-WPN252012HR24MT_C305274.html; LCSC Part Number: C305274; Item Type: Inductor
footprint WPN252012HR24MT_
pins: 1, 2

## WR483245-15F5-G
designator L?, comment 13uH
RX 1 COIL 1 LYR 13UH; Manufacturer: TDK; Manufacturer Part Number: WR483245-15F5-G; Supplier: Mouser; LCSC Part Number: 810-WR483245-15F5-G; RoHS: Yes; Item Type: Coil; Pricing: 1=5.23, 10=4.24, 50=3.55, 100=3.55, 1000=2.65, 10000=2.58 (USD); ComponentLink1URL: https://datasheet.ciiva.com/29118/wr-rx-coil-wpr-009-en-29118688.pdf?src-supplier=Digikey; ComponentLink1Description: https://datasheet.ciiva.com/29118/wr-rx-coil-wpr-009-en-29118688.pdf?src-supplier=Digikey; ComponentLink2URL: https://datasheet.ciiva.com/25222/1782025-25222386.pdf?src-supplier=Newark; ComponentLink2Description: https://datasheet.ciiva.com/25222/1782025-25222386.pdf?src-supplier=Newark; ComponentLink3URL: https://datasheet.ciiva.com/28367/1782025-28367142.pdf?src-supplier=Element14; ComponentLink3Description: https://datasheet.ciiva.com/28367/1782025-28367142.pdf?src-supplier=Element14
footprint WR483245-15F5-G
pins: 1, 2

## WR483265-15F5-G
designator L?, comment 13.3µH
RX 1 COIL 1 LYR 13.3UH; Manufacturer: TDK; Manufacturer Part Number: WR483265-15F5-G; Item Type: Wireless Charging Coils; Supplier: Mouser; Supplier Part Number: 810-WR483265-15F5-G; RoHS: Yes; Stock: 15; Pricing: 1=5.8, 10=5.28, 50=3.79, 100=3.79, 1000=2.91, 10000=2.76 (USD); ComponentLink1URL: https://datasheet.ciiva.com/25222/1782024-25222387.pdf?src-supplier=Newark; ComponentLink1Description: https://datasheet.ciiva.com/25222/1782024-25222387.pdf?src-supplier=Newark
footprint WR483265-15F5-G
pins: 1, 2

## XAL1580-202MED
designator L?, comment 2uH
POWER INDUCTOR, SHIELDED, 20% TO; Manufacturer: Coilcraft; Manufacturer Part Number: XAL1580-202MED; Item Type: Fixed Inductors; Core Material: Composite; Self Resonant Frequency: 20.1MHz; Max DC Current: 39.9A; Test Frequency: 100kHz; Supplier: Mouser; LCSC Part Number: C3911594; RoHS: Yes; Stock: 555; Pricing: 1=8.76, 10=8.76, 50=8.76, 100=8.76, 1000=6.66, 10000=6.66 (USD); Min Operating Temperature: -40°C; Max Operating Temperature: 90°C; Packaging: Tape and Reel; Tolerance: 20%; Shielding: Shielded; Value: 2uH; Termination: SMD/SMT; Series: XAL1580; Length: 16.4mm; Width: 15.4mm; Height: 7.7mm; Lead Free: Contains Lead; RoHS Compliant: Yes; ComponentLink1URL: http://www.mouser.com/ds/2/597/xal1580-270689.pdf?src-supplier=Mouser; ComponentLink1Description: http://www.mouser.com/ds/2/597/xal1580-270689.pdf?src-supplier=Mouser
footprint XAL1580-202MED
pins: 1, 2

## XAL1580-302MED
designator L?, comment 3uH
POWER INDUCTOR, SHIELDED, 20% TO; Manufacturer: Coilcraft; Manufacturer Part Number: XAL1580-302MED; Core Material: Composite; Self Resonant Frequency: 16MHz; Max DC Current: 34.4A; Test Frequency: 100kHz; Saturation Current: 43A; Supplier: Mouser; Supplier Part Number: 994-XAL1580-302MED; RoHS: Yes; Category: Fixed Inductors; Stock: 461; Pricing: 1=7.15, 10=7.15, 50=7.15, 100=7.15, 1000=3.96, 10000=3.96 (USD); Case/Package: SMD/SMT; Min Operating Temperature: -40°C; Max Operating Temperature: 90°C; Packaging: Tape and Reel; Tolerance: 20%; Shielding: Shielded; Inductance Tolerance: 20%; Value: 3uH; Termination: SMD/SMT; RMS Current (Irms): 34.4A; Series: XAL1580; Length: 16.4mm; Width: 15.4mm; Height: 7.5mm; Reach SVHC Compliant: No; Lead Free: Contains Lead; RoHS Compliant: Yes; ComponentLink1URL: https://datasheet.ciiva.com/22730/1681986-22730359.pdf?src-supplier=Element14; ComponentLink1Description: https://datasheet.ciiva.com/22730/1681986-22730359.pdf?src-supplier=Element14; Item Type: Inductor
footprint XAL1580-302MED
pins: 1, 2

## XAL5030-122MEC
designator L?, comment 1.2uH
FIXED IND 1.2UH 10.4A 12.4MOHM; Manufacturer: Coilcraft; Manufacturer Part Number: XAL5030-122MEC; Item Type: Inductors; Core Material: Composite; Self Resonant Frequency: 61MHz; Tolerance: 20%; Shielding: Shielded; Max DC Current: 11.1A; Test Frequency: 100kHz; Saturation Current: 12.5A; Supplier: Mouser; Supplier Part Number: 994-XAL5030-122MEC; RoHS: Yes; Stock: 945; Pricing: 1=2.88, 10=2.88, 50=2.88, 100=2.88, 1000=1.31, 10000=1.31 (USD); Case/Package: SMD/SMT; Min Operating Temperature: -40°C; Max Operating Temperature: 125°C; Packaging: Tape and Reel; Value: 1.2uH; Termination: SMD/SMT; Series: XAL5030; Inductance Tolerance: 20%; RMS Current (Irms): 11.1A; Length: 5.68mm; Width: 5.48mm; Height: 3.1mm; Lead Free: Contains Lead; RoHS Compliant: Yes; Reach SVHC Compliant: Unknown; ComponentLink1URL: https://datasheet.ciiva.com/22680/1681990-22680352.pdf?src-supplier=Element14; ComponentLink1Description: https://datasheet.ciiva.com/22680/1681990-22680352.pdf?src-supplier=Element14; ComponentLink2URL: https://datasheet.ciiva.com/13277/xal50xx-13277233.pdf?src-supplier=Mouser; ComponentLink2Description: https://datasheet.ciiva.com/13277/xal50xx-13277233.pdf?src-supplier=Mouser; ComponentLink3URL: https://datasheet.ciiva.com/22760/1681990-22760013.pdf?src-supplier=Farnell; ComponentLink3Description: https://datasheet.ciiva.com/22760/1681990-22760013.pdf?src-supplier=Farnell; ComponentLink4URL: https://datasheet.ciiva.com/22701/1681990-22701564.pdf?src-supplier=Element14; ComponentLink4Description: https://datasheet.ciiva.com/22701/1681990-22701564.pdf?src-supplier=Element14
footprint XAL5030-122MEC
pins: 1, 2

## XAL6030-102MEC
designator L?, comment 1uH
FIXED IND 1UH 18A 6.18MOHM SM; Manufacturer: Coilcraft; Manufacturer Part Number: XAL6030-102MEC; Core Material: Composite; Shielding: Shielded; Self Resonant Frequency: 50MHz; Tolerance: 20%; Test Frequency: 100kHz; Saturation Current: 23A; Item Type: Inductor; Supplier: Mouser; Supplier Part Number: 994-XAL6030-102MEC; RoHS: Yes; Category: Fixed Inductors; Stock: 13322; Pricing: 1=3.1, 10=3.1, 50=3.1, 100=3.1, 1000=1.42, 10000=1.42 (USD); Mounting Technology: Surface Mount; Case/Package: SMD/SMT; Min Operating Temperature: -40°C; Max Operating Temperature: 125°C; Packaging: Tape and Reel; Package Quantity: 400; Value: 1uH; Max DC Current: 18A; Termination: SMD/SMT; Series: XAL6030; Inductance Tolerance: 20%; RMS Current (Irms): 18A; Length: 6.76mm; Width: 6.56mm; Height: 3.1mm; Lead Free: Contains Lead; RoHS Compliant: Yes; Reach SVHC Compliant: No; ComponentLink1URL: https://datasheet.ciiva.com/22680/1681993-22680376.pdf?src-supplier=Element14; ComponentLink1Description: https://datasheet.ciiva.com/22680/1681993-22680376.pdf?src-supplier=Element14; ComponentLink2URL: https://datasheet.ciiva.com/22680/1681993-22680375.pdf?src-supplier=Element14; ComponentLink2Description: https://datasheet.ciiva.com/22680/1681993-22680375.pdf?src-supplier=Element14; ComponentLink3URL: https://datasheet.ciiva.com/13277/xal60xx-270658-13277255.pdf?src-supplier=Mouser; ComponentLink3Description: https://datasheet.ciiva.com/13277/xal60xx-270658-13277255.pdf?src-supplier=Mouser
footprint XAL6030-102MEC
pins: 1, 2

## XFL4020-102MEC
designator L?, comment 1uH
FIXED IND 1UH 11A 11.9MOHM SM; Manufacturer: Coilcraft; Manufacturer Part Number: XFL4020-102MEC; Core Material: Composite; Self Resonant Frequency: 64MHz; Tolerance: 20%; Shielding: Shielded; Test Frequency: 100kHz; Saturation Current: 4.5A; ESR: 11.9mR; Item Type: Inductor; Supplier: Mouser; Supplier Part Number: 994-XFL4020-102MEC; RoHS: Yes; Category: Fixed Inductors; Stock: 12821; Pricing: 1=2.68, 10=2.68, 50=2.68, 100=2.68, 1000=1.01, 10000=1.01 (USD); Mounting Technology: Surface Mount; Case/Package: SMD/SMT; Min Operating Temperature: -40°C; Max Operating Temperature: 125°C; Packaging: Tape and Reel; Value: 1uH; Max DC Current: 11A; Termination: SMD/SMT; Series: XFL4020; Inductance Tolerance: 20%; RMS Current (Irms): 11A; Length: 4.3mm; Width: 4.3mm; Height: 2.1mm; Reach SVHC Compliant: No; Lead Free: Contains Lead; RoHS Compliant: Yes; ComponentLink1URL: https://datasheet.ciiva.com/22679/1682010-22679273.pdf?src-supplier=Element14; ComponentLink1Description: https://datasheet.ciiva.com/22679/1682010-22679273.pdf?src-supplier=Element14; ComponentLink2URL: https://datasheet.ciiva.com/22679/1682010-22679274.pdf?src-supplier=Element14; ComponentLink2Description: https://datasheet.ciiva.com/22679/1682010-22679274.pdf?src-supplier=Element14; ComponentLink3URL: https://datasheet.ciiva.com/13168/xfl4020-13168079.pdf?src-supplier=Mouser; ComponentLink3Description: https://datasheet.ciiva.com/13168/xfl4020-13168079.pdf?src-supplier=Mouser; LCSC Part Number: C5355380
footprint XFL4020-102MEC
pins: 1, 2

## XFL4020-152MEC
designator L?, comment 1.5uH
FIXED IND 1.5UH 9.1A 15.8MOHM SM; Manufacturer: Coilcraft; Manufacturer Part Number: XFL4020-152MEC; Item Type: Inductors; ESR: 15.8mR; Supplier: Mouser; LCSC Part Number: C3033018; RoHS: Yes; Stock: 9871; Pricing: 1=3.04, 10=2.59, 50=2.39, 100=1.78, 1000=1.23, 10000=1.23 (USD); ComponentLink1URL: https://datasheet.ciiva.com/13168/xfl4020-13168080.pdf?src-supplier=Mouser; ComponentLink1Description: https://datasheet.ciiva.com/13168/xfl4020-13168080.pdf?src-supplier=Mouser; ComponentLink2URL: https://datasheet.ciiva.com/22679/1682010-22679275.pdf?src-supplier=Element14; ComponentLink2Description: https://datasheet.ciiva.com/22679/1682010-22679275.pdf?src-supplier=Element14; ComponentLink3URL: https://datasheet.ciiva.com/22679/1682010-22679276.pdf?src-supplier=Element14; ComponentLink3Description: https://datasheet.ciiva.com/22679/1682010-22679276.pdf?src-supplier=Element14
footprint XFL4020-152MEC
pins: 1, 2

## XRNR6045-470uH/M
designator L?, comment 470uH
420mA 470uH Magnetic Shielded Inductor ±20% 500mA 1.8Ω SMD,6x6mm Fixed Inductors ROHS; Manufacturer: XR; Manufacturer Part Number: XRNR6045-470uH/M; Package: SMD,6x6mm; LCSC Part Number: C5339751; Item Type: Inductor
footprint XRNR6045-470uH/M
pins: 1, 2

## XRT16128-453HFRL45
designator FL?
45mH 2 Through Hole,D=20mm Common Mode Chokes ROHS; Manufacturer: XR; Manufacturer Part Number: XRT16128-453HFRL45; Item Type: Choke; Package: Through Hole,D=20mm; LCSC part Number: C30587283
pins: 1, 2, 3, 4
text: N1; N2

## XRTC404030S2R2MGCA
designator L?, comment 2.2uH
9A 2.2uH ±20% 10.5A SMD,4x4mm Power Inductors ROHS; Manufacturer: XR; Manufacturer Part Number: XRTC404030S2R2MGCA; Package: SMD,4x4mm; LCSC Part Number: C39846868; Item Type: Inductors; ComponentLink1Description: LCSC; ComponentLink1URL: https://www.lcsc.com/product-detail/Power-Inductors_XR-XRTC404030S2R2MGCA_C39846868.html
footprint XRTC404030S2R2MGCA
pins: 1, 2

## YHNR3012-R47M
designator L?, comment 470nH
4.2A 470nH 合金磁胶电感 ±20% 8A SMD,3x3mm Power Inductors ROHS; Manufacturer: YJYCOIN; Manufacturer Part Number: YHNR3012-R47M; Package: SMD,3x3mm; LCSC Part Number: C20416183; Item Type: Inductor; ComponentLink1Description: LCSC; ComponentLink1URL: https://www.lcsc.com/product-detail/Power-Inductors_YJYCOIN-YHNR3012-R47M_C20416183.html
footprint YHNR3012-R47M
pins: 1, 2

## YNR4018-220M
designator L?, comment 22uH
590mA 22uH ±20% SMD,4x4x1.8mm Power Inductors ROHS; Manufacturer: YJYCOIN; Manufacturer Part Number: YNR4018-220M; Package: SMD,4x4x1.8mm; LCSC Part Number: C340373; Item Type: Inductor; ComponentLink1Description: LCSC; ComponentLink1URL: https://www.lcsc.com/product-detail/Power-Inductors_YJYCOIN-YNR4018-220M_C340373.html
footprint YNR4018-220M
pins: 1, 2

## YNR6045-221M
designator L?, comment 220uH
590mA 220uH ±20% SMD,6x6mm Power Inductors ROHS; Manufacturer: YJYCOIN; Manufacturer Part Number: YNR6045-221M; Package: SMD,6x6mm; LCSC Part Number: C497842; Item Type: Inductor; ComponentLink1Description: LCSC; ComponentLink1URL: https://www.lcsc.com/product-detail/Power-Inductors_YJYCOIN-YNR6045-221M_C497842.html
footprint YNR6045-221M
pins: 1, 2

## YPRH0703-4R7M
designator L?, comment 4.7uH
2.26A 4.7uH ±20% SMD,7.3x7.3mm Power Inductors ROHS; Manufacturer: YJYCOIN; Manufacturer Part Number: YPRH0703-4R7M; Package: SMD,7.3x7.3mm; LCSC Part Number: C338836; Item type: Inductor; ComponentLink1Description: LCSC; ComponentLink1URL: https://www.lcsc.com/product-detail/Power-Inductors_YJYCOIN-YPRH0703-4R7M_C338836.html
footprint YPRH0703-4R7M
pins: 1, 2

## YPRH0704-4R7M
designator L?, comment 4.7uH
3.7A 4.7uH ±20% SMD,7.3x7.3mm Power Inductors ROHS; Manufacturer: YJYCOIN; Manufacturer Part Number: YPRH0704-4R7M; Package: SMD,7.3x7.3mm; LCSC Part Number: C514806; Item Type: Inductor; ComponentLink1Description: LCSC; ComponentLink1URL: https://www.lcsc.com/product-detail/Power-Inductors_YJYCOIN-YPRH0704-4R7M_C514806.html
footprint YPRH0704-4R7M
pins: 1, 2

## YPRH1204-220M
designator L?, comment 22UH
2.9A 22uH ±20% 66mΩ SMD,12x12x5mm Power Inductors ROHS; Manufacturer: YJYCOIN; Manufacturer Part Number: YPRH1204-220M; Package: SMD,12x12x5mm; LCSC Part Number: C338845; Item Type: Inductor; ComponentLink1Description: LCSC; ComponentLink1URL: https://www.lcsc.com/product-detail/Power-Inductors_YJYCOIN-YPRH1204-220M_C338845.html
footprint YPRH1204-220M_
pins: 1, 2

## YPRH1508-330M
designator L?, comment 33uH
6A 33uH ±20% SMD,15x15x8mm Power Inductors ROHS; Manufacturer: YJYCOIN; Manufacturer Part Number: YPRH1508-330M; ComponentLink1Description: LCSC; ComponentLink1URL: https://www.lcsc.com/product-detail/Power-Inductors_YJYCOIN-YPRH1508-330M_C970542.html; Package: SMD,15x15x8mm; LCSC Part Number: C970542; Item Type: Inductor
footprint YPRH1508-330M
pins: 1, 2